# Altium footprint library Mosfet$.PcbLib: 62 footprints (part 3 of 4)
Each footprint in its own frame and in the unit in brackets; x right, y up, seen from the top. Pads: shape width x height; smd on the part's side, far side on the other; paste and mask are expansions set on the pad; w line width, h text height; cw(c..) or ccw(c..) is an arc to the next point about the centre after c.
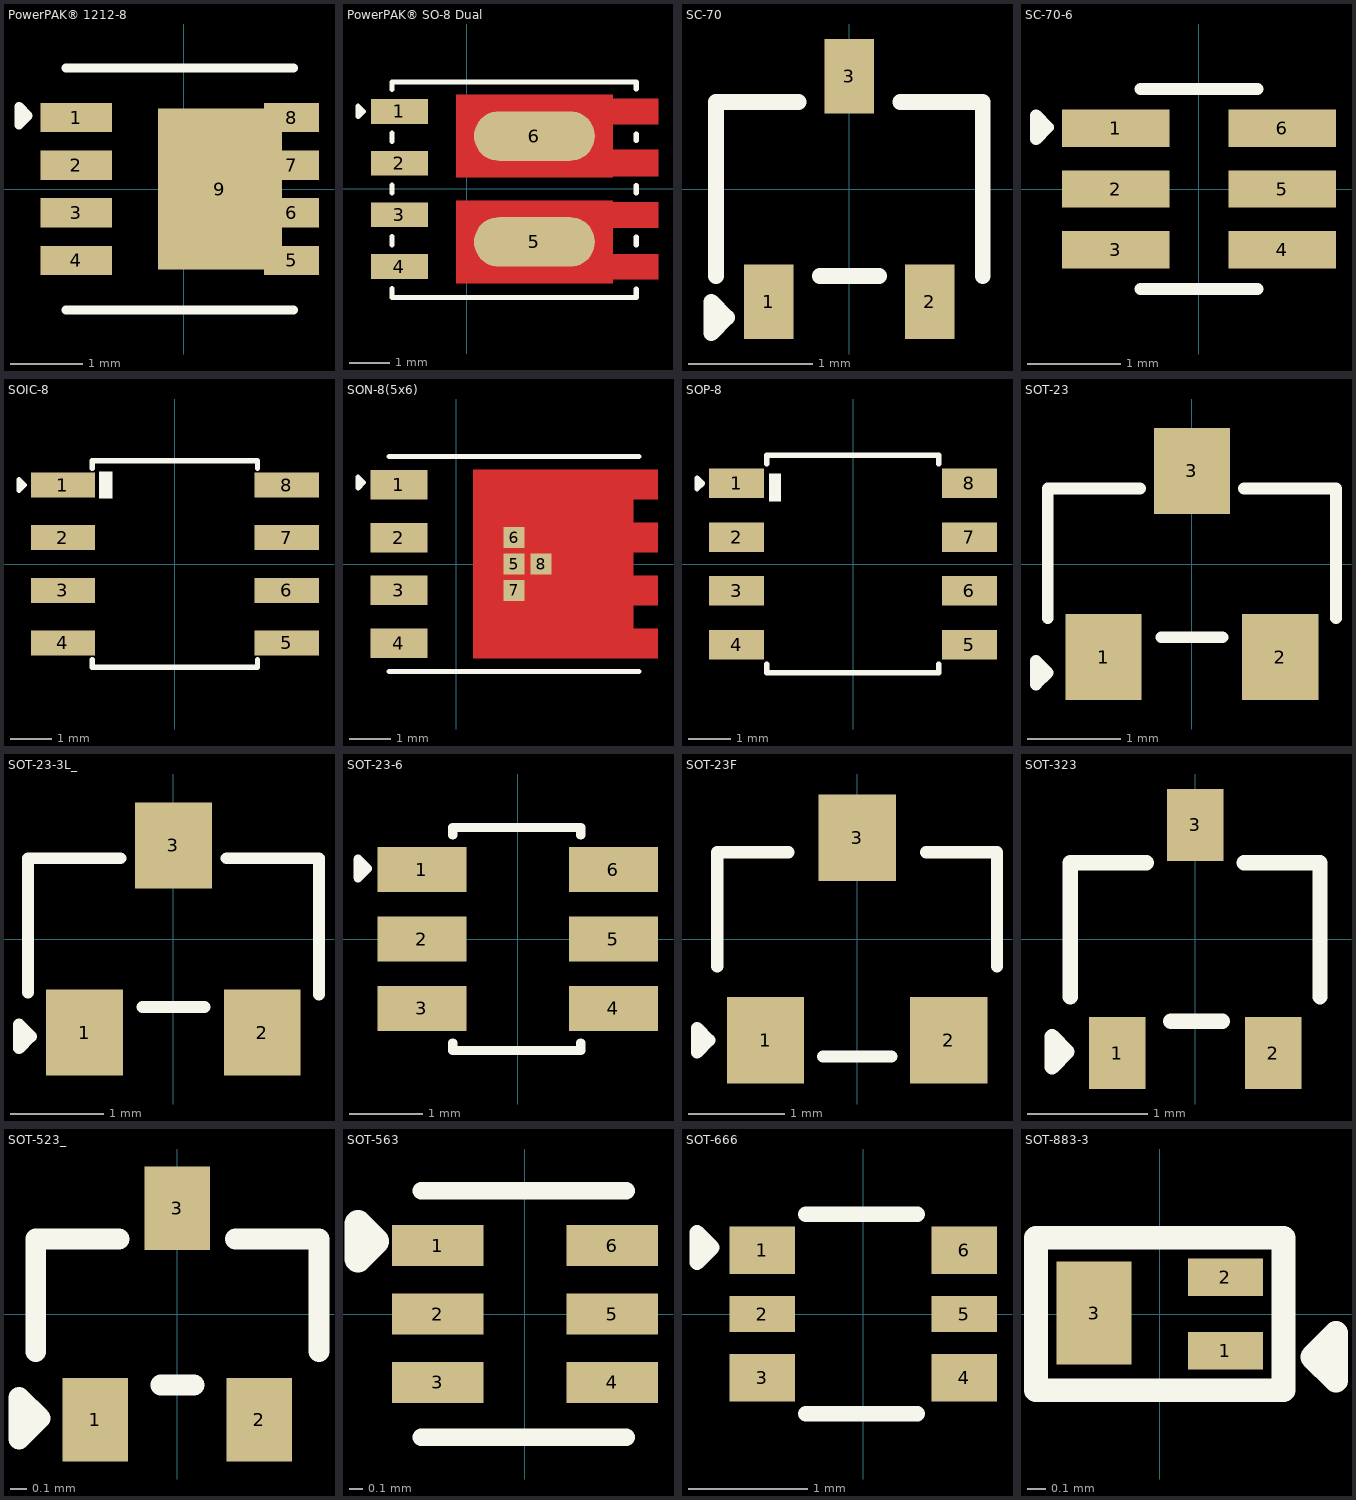
[diagram p2: the footprints below, top view; thin cyan lines are the x and y axes]

## PowerPAK® 1212-8 [mm]
pads (9):
  rect 0.99x0.405 smd: 1(-1.492,0.99) 2(-1.492,0.33) 3(-1.492,-0.33) 4(-1.492,-0.99)
  rect 0.76x0.405 smd: 5(1.493,-0.99) 6(1.493,-0.33) 7(1.493,0.33) 8(1.493,0.99)
  rect 1.725x2.235 smd: 9(0.5,0)
Top Overlay:
  lines w0.127: -1.632,-1.677 1.518,-1.677 ; -1.632,1.677 1.518,1.677 ; -2.286,0.889 -2.159,1.016 -2.286,1.143 -2.286,0.889
3D body "PowerPAK 1212-8.STEP": height 1.06, standoff 0, extent -1.85,-1.65 1.85,1.65

## PowerPAK® SO-8 Dual [mil]
pads (6):
  rect 55x24 smd: 1(-65.35,75) 2(-65.35,25) 3(-65.35,-25) 4(-65.35,-75)
  oval 117x47.91 smd: 5(65.35,-51.18) 6(65.35,51.18)
Top Layer:
  region: -10.14,-11.26 140.84,-11.26 140.84,-12.79 184.86,-12.79 184.86,-37.36 140.84,-37.36 140.84,-62.95 184.86,-62.95 184.86,-87.52 140.84,-87.52 140.84,-91.1 -10.14,-91.1
  region: -10.14,91.1 140.84,91.1 140.84,87.52 184.86,87.52 184.86,62.44 140.84,62.44 140.84,37.88 184.86,37.88 184.86,12.28 140.84,12.28 140.84,11.26 -10.14,11.26
Top Overlay:
  lines w5: -72.45,-105 163.75,-105 163.75,-96.62 ; -72.45,-103.5 -72.45,-96.1 ; -72.45,-53.9 -72.45,-46.1 ; -72.45,-3.9 -72.45,3.9 ; -72.45,46.1 -72.45,53.9 ; -72.45,96.1 -72.45,103.5 163.75,103.5 163.75,96.62 ; 163.75,-53.85 163.75,-46.46 ; 163.75,-3.69 163.75,3.18 ; 163.75,46.98 163.75,53.34 ; -105.35,70 -100.35,75 -105.35,80 -105.35,70
3D body "SI7288DP-T1-GE3.step": height 44, standoff 0, extent -75,-101.5 167,101.5

## SC-70 [mm]
pads (3):
  rect 0.4x0.6 smd paste+0 mask+0.051: 1(-0.65,-0.91) 2(0.65,-0.91) 3(0,0.91)
Top Overlay:
  lines w0.127: -1.076,-0.701 -1.076,0.701 -0.411,0.701 ; -0.239,-0.701 0.239,-0.701 ; 0.411,0.701 1.076,0.701 1.076,-0.701 ; -1.114,-1.164 -0.987,-1.037 -1.114,-0.91 -1.114,-1.164
3D body "C383208.step": height 1, standoff 0, extent -1,-1.05 1,1.05

## SC-70-6 [mm]
pads (6):
  rect 1.15x0.4 smd: 1(-0.89,0.65) 2(-0.89,0) 3(-0.89,-0.65) 4(0.89,-0.65) 5(0.89,0) 6(0.89,0.65)
Top Overlay:
  lines w0.127: -0.625,-1.07 0.625,-1.07 ; -0.625,1.07 0.625,1.07 ; -1.741,0.533 -1.614,0.66 -1.741,0.787 -1.741,0.533
3D body "step_temp.STEP": height 1.1, standoff 0, extent -1.05,-1 1.05,1

## SOIC-8 [mm]
pads (8):
  rect 1.55x0.6 smd: 1(-2.7,1.905) 2(-2.7,0.635) 3(-2.7,-0.635) 4(-2.7,-1.905) 5(2.7,-1.905) 6(2.7,-0.635) 7(2.7,0.635) 8(2.7,1.905)
Top Overlay:
  rectangle: -1.829,1.575 -1.499,2.235
  lines w0.127: -1.991,-2.311 -1.991,-2.489 1.991,-2.489 1.991,-2.311 ; -1.991,2.311 -1.991,2.489 1.991,2.489 1.991,2.311 ; -3.759,1.778 -3.632,1.905 -3.759,2.032 -3.759,1.778
3D body "User Library-SOIC-8-1.STEP": height 1.7, standoff -0.05, extent -3,-2.45 3,2.45

## SON-8(5x6) [mm]
pads (8):
  rect 1.372x0.71 smd paste-0.15: 1(-1.385,1.905) 2(-1.385,0.635) 3(-1.385,-0.635) 4(-1.385,-1.905)
  rect 0.5x0.5 smd paste-1 mask+0: 5(1.385,0) 6(1.385,0.635) 7(1.385,-0.635) 8(2.032,0)
Top Layer:
  region: 4.841,1.55 4.251,1.55 4.251,0.99 4.841,0.99 4.841,0.28 4.251,0.28 4.251,-0.28 4.841,-0.28 4.841,-0.99 4.251,-0.99 4.251,-1.55 4.841,-1.55 4.841,-2.26 0.401,-2.26 0.401,2.26 4.841,2.26
Top Overlay:
  lines w0.127: -1.615,-2.58 4.385,-2.58 ; -1.615,2.58 4.385,2.58 ; -2.366,1.829 -2.239,1.956 -2.366,2.083 -2.366,1.829
3D body "step_temp.STEP": height 1.05, standoff 0, extent -1.615,-2.5 4.385,2.5

## SOP-8 [mm]
pads (8):
  rect 1.3x0.7 smd: 1(-2.75,1.905) 2(-2.75,0.635) 3(-2.75,-0.635) 4(-2.75,-1.905) 5(2.75,-1.905) 6(2.75,-0.635) 7(2.75,0.635) 8(2.75,1.905)
Top Overlay:
  rectangle: -1.981,1.473 -1.702,2.134
  lines w0.127: -2.036,-2.362 -2.036,-2.565 2.028,-2.565 2.028,-2.362 ; -2.036,2.362 -2.036,2.565 2.028,2.565 2.028,2.362 ; -3.687,1.778 -3.687,2.032 -3.56,1.905 -3.687,1.778
3D body "TRANS_IRF7103TRPBF_INF.step": height 1.76, standoff 0, extent -3.099,-2.502 3.099,2.502

## SOT-23 [mm] "TRANS NPN 40V 0.6A SOT23"
pads (3):
  rect 0.82x0.92 smd: 1(-0.95,-1) 2(0.95,-1) 3(0,1)
Top Overlay:
  lines w0.127: -1.549,-0.584 -1.549,0.813 -0.559,0.813 ; -0.33,-0.787 0.33,-0.787 ; 0.559,0.813 1.549,0.813 1.549,-0.584 ; -1.676,-1.295 -1.549,-1.168 -1.676,-1.041 -1.676,-1.295
3D body "CircuitWorks-SOT-23.step": height 1.05, standoff -0.05, extent -1.5,-1.25 1.5,1.25

## SOT-23-3L_ [mm]
pads (3):
  rect 0.82x0.92 smd: 1(-0.95,-1) 2(0.95,-1) 3(0,1)
Top Overlay:
  lines w0.127: -1.556,-0.572 -1.556,0.864 -0.566,0.864 ; -0.33,-0.728 0.33,-0.728 ; 0.566,0.864 1.556,0.864 1.556,-0.594 ; -1.651,-1.168 -1.651,-0.914 -1.524,-1.041 -1.651,-1.168
3D body "CircuitWorks-SOT-23.step": height 1.1, standoff 0, extent -1.5,-1.25 1.5,1.25

## SOT-23-6 [mm]
pads (6):
  rect 1.22x0.62 smd: 1(-1.31,0.95) 2(-1.31,0) 3(-1.31,-0.95) 4(1.31,-0.95) 5(1.31,0) 6(1.31,0.95)
Top Overlay:
  lines w0.127: -0.889,-1.424 -0.889,-1.524 0.864,-1.524 0.864,-1.424 ; -0.889,1.424 -0.889,1.524 0.864,1.524 0.864,1.424 ; -2.184,0.838 -2.057,0.965 -2.184,1.092 -2.184,0.838
3D body "21-0058I_MXM.step": height 1.47, standoff 0.02, extent -1.499,-1.499 1.499,1.499

## SOT-23F [mm]
pads (3):
  rect 0.8x0.9 smd: 1(-0.95,-1.05) 2(0.95,-1.05) 3(0,1.05)
Top Overlay:
  lines w0.127: -1.45,-0.286 -1.45,0.9 -0.714,0.9 ; -0.356,-1.219 0.356,-1.219 ; 0.714,0.9 1.45,0.9 1.45,-0.286 ; -1.661,-1.177 -1.661,-0.923 -1.534,-1.05 -1.661,-1.177
3D body "SSM3K333R_LF.step": height 0.88, standoff 0, extent -1.45,-1.2 1.45,1.2

## SOT-323 [mm]
pads (3):
  rect 0.47x0.6 smd: 1(-0.65,-0.95) 2(0.65,-0.95) 3(0,0.95)
Top Overlay:
  lines w0.127: -1.041,-0.483 -1.041,0.635 -0.406,0.635 ; -0.203,-0.686 0.229,-0.686 ; 0.406,0.635 1.041,0.635 1.041,-0.483 ; -1.194,-1.067 -1.194,-0.813 -1.067,-0.94 -1.194,-1.067
3D body "DMN2065UWQ-7.STEP": height 1.1, standoff 0, extent -1,-1.05 1,1.05

## SOT-523_ [mm]
pads (3):
  rect 0.4x0.51 smd: 1(-0.5,-0.645) 2(0.5,-0.645) 3(0,0.645)
Top Overlay:
  lines w0.127: -0.864,-0.229 -0.864,0.457 -0.356,0.457 ; -0.102,-0.432 0.102,-0.432 ; 0.356,0.457 0.864,0.457 0.864,-0.229 ; -0.965,-0.762 -0.965,-0.508 -0.838,-0.635 -0.965,-0.762
3D body "User Library-SOT-523.step": height 0.8, standoff 0, extent -0.8,-0.8 0.8,0.8

## SOT-563 [mm]
pads (6):
  rect 0.67x0.3 smd mask+0.07: 1(-0.638,0.5) 2(-0.638,0) 3(-0.638,-0.5) 4(0.638,-0.5) 5(0.638,0) 6(0.638,0.5)
Top Overlay:
  lines w0.127: -0.759,-0.902 0.741,-0.902 ; -0.759,0.902 0.741,0.902
  lines w0.2: -1.22,0.405 -1.093,0.532 -1.22,0.659 -1.22,0.405
3D body "SOT_X-T1-GE3_VIS.step": height 0.61, standoff 0, extent -0.851,-0.851 0.851,0.851

## SOT-666 [mm]
pads (6):
  rect 0.55x0.4 smd mask+0.07: 1(-0.85,0.537) 3(-0.85,-0.537) 4(0.85,-0.537) 6(0.85,0.537)
  rect 0.55x0.3 smd mask+0.07: 2(-0.85,0) 5(0.85,0)
Top Overlay:
  lines w0.127: -0.483,-0.838 0.457,-0.838 ; -0.483,0.838 0.457,0.838 ; -1.397,0.432 -1.27,0.559 -1.397,0.686 -1.397,0.432
3D body "NX1029X_115.step": height 0.6, standoff 0, extent -0.8,-0.8 0.8,0.8

## SOT-883-3 [mm]
pads (3):
  rect 0.4x0.2 smd paste+0 mask+0.05: 1(0.35,-0.195) 2(0.35,0.195)
  rect 0.4x0.55 smd paste+0 mask+0.05: 3(-0.35,0.005)
Top Overlay:
  lines w0.127: -0.66,-0.406 -0.66,0.406 0.66,0.406 0.66,-0.406 -0.66,-0.406 ; 0.813,-0.229 0.94,-0.356 0.94,-0.102 0.813,-0.229
3D body "C172433.step": height 0.5, standoff 0, extent -0.51,-0.305 0.51,0.315